# Altium footprint library Connector-FPC.PcbLib: 104 footprints (part 1 of 7)
Each footprint in its own frame and in the unit in brackets; x right, y up, seen from the top. Pads: shape width x height; smd on the part's side, far side on the other; paste and mask are expansions set on the pad; w line width, h text height; cw(c..) or ccw(c..) is an arc to the next point about the centre after c.
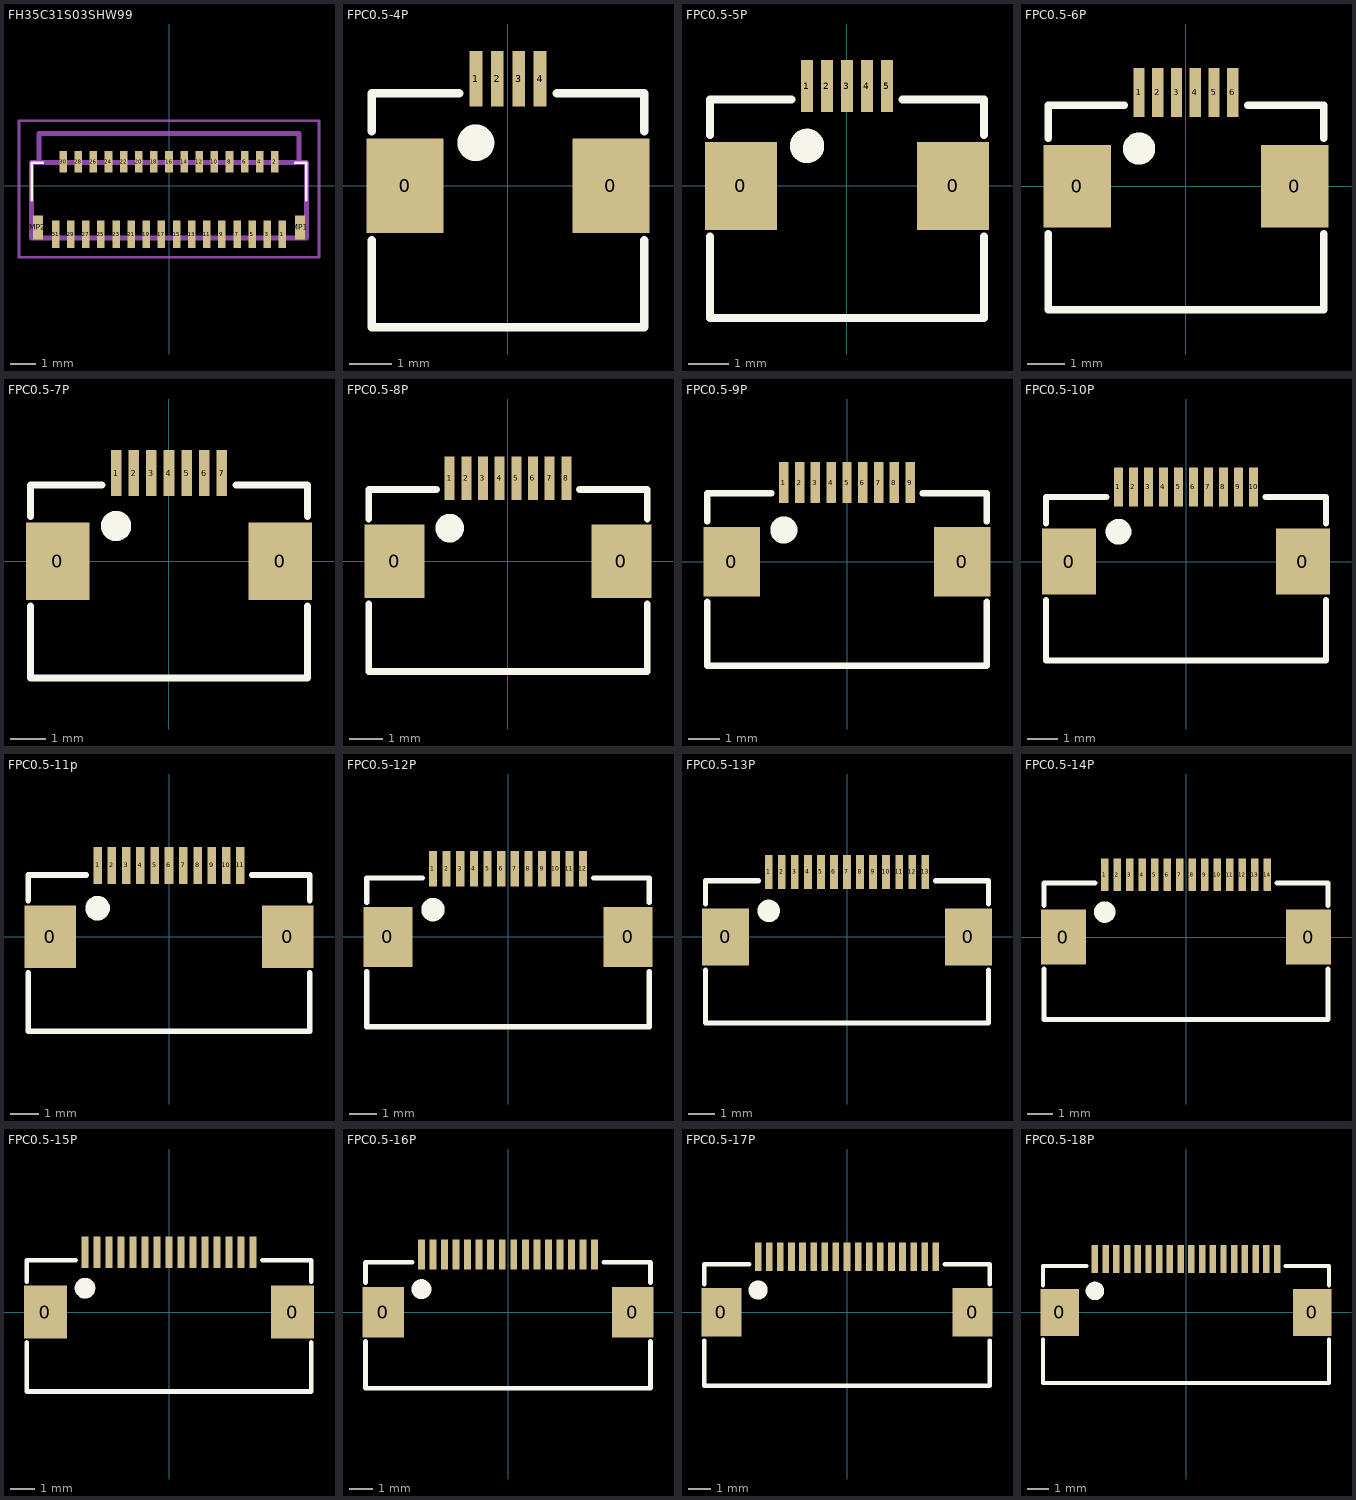
[diagram p0: the footprints below, top view; thin cyan lines are the x and y axes]

## FH35C31S03SHW99 [mm]
pads (33):
  rect 0.3x1.1 smd: 1(4.5,-1.925) 3(3.9,-1.925) 5(3.3,-1.925) 7(2.7,-1.925) 9(2.1,-1.925) 11(1.5,-1.925) 13(0.9,-1.925) 15(0.3,-1.925) 17(-0.3,-1.925) 19(-0.9,-1.925) 21(-1.5,-1.925) 23(-2.1,-1.925) 25(-2.7,-1.925) 27(-3.3,-1.925) 29(-3.9,-1.925) 31(-4.5,-1.925)
  rect 0.3x0.85 smd: 2(4.2,0.95) 4(3.6,0.95) 6(3,0.95) 8(2.4,0.95) 10(1.8,0.95) 12(1.2,0.95) 14(0.6,0.95) 16(0,0.95) 18(-0.6,0.95) 20(-1.2,0.95) 22(-1.8,0.95) 24(-2.4,0.95) 26(-3,0.95) 28(-3.6,0.95) 30(-4.2,0.95)
  rect 0.4x0.95 smd: MP1(5.2,-1.65) MP2(-5.2,-1.65)
Top Overlay:
  lines w0.1: -5.45,-0.575 -5.45,0.925 -5,0.925 ; 5,0.925 5.45,0.925 5.45,-0.575
Body Extra:
  lines w0.2: -5.45,-2.075 -5.45,0.925 5.45,0.925 5.45,-2.075 -5.45,-2.075 ; -5.165,0.925 5.165,0.925 5.165,2.075 -5.165,2.075 -5.165,0.925
Bottom Courtyard:
  lines w0.1: -5.95,-2.825 -5.95,2.575 5.95,2.575 5.95,-2.825 -5.95,-2.825
3D body "FH35-31S-0.3SHW.stp": height 0.84, standoff -0.06, extent -5.45,-2.159 5.45,2.041

## FPC0.5-4P [mm]
pads (6):
  rect 1.8x2.2 smd: 0(-2.4,0) 0(2.4,0)
  rect 0.3x1.3 smd: 1(-0.75,2.497) 2(-0.25,2.497) 3(0.25,2.497) 4(0.75,2.497)
Top Overlay:
  circle w0.5: c-0.75,1 r0.18
  lines w0.2: -3.175,-1.27 -3.175,-3.302 3.175,-3.302 3.175,-1.27 ; -3.175,1.27 -3.175,2.159 -1.143,2.159 ; 1.143,2.159 3.175,2.159 3.175,1.27
3D body "FPC0.5-4P.STEP": height 2, standoff -0.01, extent -3.1,-3.13 3.1,2.87

## FPC0.5-5P [mm]
pads (7):
  rect 1.8x2.2 smd: 0(-2.65,0) 0(2.65,0)
  rect 0.3x1.3 smd: 1(-1,2.497) 2(-0.5,2.497) 3(0,2.497) 4(0.5,2.497) 5(1,2.497)
Top Overlay:
  circle w0.5: c-1,1 r0.18
  lines w0.2: -3.425,-1.27 -3.425,-3.302 3.425,-3.302 3.425,-1.27 ; -3.425,1.27 -3.425,2.159 -1.393,2.159 ; 1.393,2.159 3.425,2.159 3.425,1.27
3D body "FPC0.5-5P.STEP": height 2, standoff -0.01, extent -3.35,-3.15 3.35,2.85

## FPC0.5-6P [mm]
pads (8):
  rect 1.8x2.2 smd: 0(-2.9,0) 0(2.9,0)
  rect 0.3x1.3 smd: 1(-1.25,2.497) 2(-0.75,2.497) 3(-0.25,2.497) 4(0.25,2.497) 5(0.75,2.497) 6(1.25,2.497)
Top Overlay:
  circle w0.5: c-1.25,1 r0.18
  lines w0.2: -3.675,-1.27 -3.675,-3.302 3.675,-3.302 3.675,-1.27 ; -3.675,1.27 -3.675,2.159 -1.643,2.159 ; 1.643,2.159 3.675,2.159 3.675,1.27
3D body "FPC0.5-6P.STEP": height 2, standoff -0.01, extent -3.6,-3.048 3.6,2.952

## FPC0.5-7P [mm]
pads (9):
  rect 1.8x2.2 smd: 0(-3.15,0) 0(3.15,0)
  rect 0.3x1.3 smd: 1(-1.5,2.497) 2(-1,2.497) 3(-0.5,2.497) 4(0,2.497) 5(0.5,2.497) 6(1,2.497) 7(1.5,2.497)
Top Overlay:
  circle w0.5: c-1.5,1 r0.18
  lines w0.2: -3.925,-1.27 -3.925,-3.302 3.925,-3.302 3.925,-1.27 ; -3.925,1.27 -3.925,2.159 -1.893,2.159 ; 1.893,2.159 3.925,2.159 3.925,1.27
3D body "FPC0.5-7P.STEP": height 2, standoff -0.01, extent -3.85,-3.181 3.85,2.819

## FPC0.5-8P [mm]
pads (10):
  rect 1.8x2.2 smd: 0(-3.4,0) 0(3.4,0)
  rect 0.3x1.3 smd: 1(-1.75,2.497) 2(-1.25,2.497) 3(-0.75,2.497) 4(-0.25,2.497) 5(0.25,2.497) 6(0.75,2.497) 7(1.25,2.497) 8(1.75,2.497)
Top Overlay:
  circle w0.5: c-1.75,1 r0.18
  lines w0.2: -4.175,-1.27 -4.175,-3.302 4.175,-3.302 4.175,-1.27 ; -4.175,1.27 -4.175,2.159 -2.143,2.159 ; 2.143,2.159 4.175,2.159 4.175,1.27
3D body "FPC0.5-8P.STEP": height 2, standoff -0.01, extent -4.111,-3.229 4.089,2.771

## FPC0.5-9P [mm]
pads (11):
  rect 1.8x2.2 smd: 0(-3.65,0) 0(3.65,0)
  rect 0.3x1.3 smd: 1(-2,2.497) 2(-1.5,2.497) 3(-1,2.497) 4(-0.5,2.497) 5(0,2.497) 6(0.5,2.497) 7(1,2.497) 8(1.5,2.497) 9(2,2.497)
Top Overlay:
  circle w0.5: c-2,1 r0.18
  lines w0.2: -4.425,-1.27 -4.425,-3.302 4.425,-3.302 4.425,-1.27 ; -4.425,1.27 -4.425,2.159 -2.393,2.159 ; 2.393,2.159 4.425,2.159 4.425,1.27
3D body "FPC0.5-9P.STEP": height 2, standoff -0.01, extent -4.35,-3.15 4.35,2.85

## FPC0.5-10P [mm]
pads (12):
  rect 1.8x2.2 smd: 0(-3.9,0) 0(3.9,0)
  rect 0.3x1.3 smd: 1(-2.25,2.497) 2(-1.75,2.497) 3(-1.25,2.497) 4(-0.75,2.497) 5(-0.25,2.497) 6(0.25,2.497) 7(0.75,2.497) 8(1.25,2.497) 9(1.75,2.497) 10(2.25,2.497)
Top Overlay:
  circle w0.5: c-2.25,1 r0.18
  lines w0.2: -4.675,-1.27 -4.675,-3.302 4.675,-3.302 4.675,-1.27 ; -4.675,1.27 -4.675,2.159 -2.643,2.159 ; 2.643,2.159 4.675,2.159 4.675,1.27
3D body "FPC0.5-10P.STEP": height 2, standoff -0.01, extent -4.6,-3.175 4.6,2.825

## FPC0.5-11p [mm]
pads (13):
  rect 1.8x2.2 smd: 0(-4.15,0) 0(4.15,0)
  rect 0.3x1.3 smd: 1(-2.5,2.497) 2(-2,2.497) 3(-1.5,2.497) 4(-1,2.497) 5(-0.5,2.497) 6(0,2.497) 7(0.5,2.497) 8(1,2.497) 9(1.5,2.497) 10(2,2.497) 11(2.5,2.497)
Top Overlay:
  circle w0.5: c-2.5,1 r0.18
  lines w0.2: -4.925,-1.27 -4.925,-3.302 4.925,-3.302 4.925,-1.27 ; -4.925,1.27 -4.925,2.159 -2.893,2.159 ; 2.893,2.159 4.925,2.159 4.925,1.27
3D body "FPC0.5-11P.STEP": height 2, standoff -0.01, extent -4.85,-3.181 4.85,2.819

## FPC0.5-12P [mm]
pads (14):
  rect 1.8x2.2 smd: 0(-4.4,0) 0(4.4,0)
  rect 0.3x1.3 smd: 1(-2.75,2.497) 2(-2.25,2.497) 3(-1.75,2.497) 4(-1.25,2.497) 5(-0.75,2.497) 6(-0.25,2.497) 7(0.25,2.497) 8(0.75,2.497) 9(1.25,2.497) 10(1.75,2.497) 11(2.25,2.497) 12(2.75,2.497)
Top Overlay:
  circle w0.5: c-2.75,1 r0.18
  lines w0.2: -5.175,-1.27 -5.175,-3.302 5.175,-3.302 5.175,-1.27 ; -5.175,1.27 -5.175,2.159 -3.143,2.159 ; 3.143,2.159 5.175,2.159 5.175,1.27
3D body "FPC0.5-12P.STEP": height 2, standoff -0.01, extent -5.1,-3.231 5.1,2.769

## FPC0.5-13P [mm]
pads (15):
  rect 1.8x2.2 smd: 0(-4.65,0) 0(4.65,0)
  rect 0.3x1.3 smd: 1(-3,2.497) 2(-2.5,2.497) 3(-2,2.497) 4(-1.5,2.497) 5(-1,2.497) 6(-0.5,2.497) 7(0,2.497) 8(0.5,2.497) 9(1,2.497) 10(1.5,2.497) 11(2,2.497) 12(2.5,2.497) 13(3,2.497)
Top Overlay:
  circle w0.5: c-3,1 r0.18
  lines w0.2: -5.425,-1.27 -5.425,-3.302 5.425,-3.302 5.425,-1.27 ; -5.425,1.27 -5.425,2.159 -3.393,2.159 ; 3.393,2.159 5.425,2.159 5.425,1.27
3D body "FPC0.5-13P.STEP": height 2, standoff -0.01, extent -5.35,-3.181 5.35,2.819

## FPC0.5-14P [mm]
pads (16):
  rect 1.8x2.2 smd: 0(-4.9,0) 0(4.9,0)
  rect 0.3x1.3 smd: 1(-3.25,2.497) 2(-2.75,2.497) 3(-2.25,2.497) 4(-1.75,2.497) 5(-1.25,2.497) 6(-0.75,2.497) 7(-0.25,2.497) 8(0.25,2.497) 9(0.75,2.497) 10(1.25,2.497) 11(1.75,2.497) 12(2.25,2.497) 13(2.75,2.497) 14(3.25,2.497)
Top Overlay:
  circle w0.5: c-3.25,1 r0.18
  lines w0.2: -5.675,-1.27 -5.675,-3.302 5.675,-3.302 5.675,-1.27 ; -5.675,1.27 -5.675,2.159 -3.643,2.159 ; 3.643,2.159 5.675,2.159 5.675,1.27
3D body "FPC0.5-14P.STEP": height 2, standoff -0.01, extent -5.6,-3.226 5.6,2.774

## FPC0.5-15P [mm]
pads (17):
  rect 1.8x2.2 smd: 0(-5.15,0) 0(5.15,0)
  rect 0.3x1.3 smd: 1(-3.5,2.497) 2(-3,2.497) 3(-2.5,2.497) 4(-2,2.497) 5(-1.5,2.497) 6(-1,2.497) 7(-0.5,2.497) 8(0,2.497) 9(0.5,2.497) 10(1,2.497) 11(1.5,2.497) 12(2,2.497) 13(2.5,2.497) 14(3,2.497) 15(3.5,2.497)
Top Overlay:
  circle w0.5: c-3.5,1 r0.18
  lines w0.2: -5.925,-1.27 -5.925,-3.302 5.925,-3.302 5.925,-1.27 ; -5.925,1.27 -5.925,2.159 -3.893,2.159 ; 3.893,2.159 5.925,2.159 5.925,1.27
3D body "FPC0.5-15P.STEP": height 2, standoff -0.01, extent -5.875,-3.257 5.825,2.743

## FPC0.5-16P [mm]
pads (18):
  rect 1.8x2.2 smd: 0(-5.4,0) 0(5.4,0)
  rect 0.3x1.3 smd: 1(-3.75,2.497) 2(-3.25,2.497) 3(-2.75,2.497) 4(-2.25,2.497) 5(-1.75,2.497) 6(-1.25,2.497) 7(-0.75,2.497) 8(-0.25,2.497) 9(0.25,2.497) 10(0.75,2.497) 11(1.25,2.497) 12(1.75,2.497) 13(2.25,2.497) 14(2.75,2.497) 15(3.25,2.497) 16(3.75,2.497)
Top Overlay:
  circle w0.5: c-3.75,1 r0.18
  lines w0.2: -6.175,-1.27 -6.175,-3.302 6.175,-3.302 6.175,-1.27 ; -6.175,1.27 -6.175,2.159 -4.143,2.159 ; 4.143,2.159 6.175,2.159 6.175,1.27
3D body "FPC0.5-16P.STEP": height 2, standoff -0.01, extent -6.1,-3.231 6.1,2.769

## FPC0.5-17P [mm]
pads (19):
  rect 1.8x2.2 smd: 0(-5.65,0) 0(5.65,0)
  rect 0.3x1.3 smd: 1(-4,2.497) 2(-3.5,2.497) 3(-3,2.497) 4(-2.5,2.497) 5(-2,2.497) 6(-1.5,2.497) 7(-1,2.497) 8(-0.5,2.497) 9(0,2.497) 10(0.5,2.497) 11(1,2.497) 12(1.5,2.497) 13(2,2.497) 14(2.5,2.497) 15(3,2.497) 16(3.5,2.497) 17(4,2.497)
Top Overlay:
  circle w0.5: c-4,1 r0.18
  lines w0.2: -6.425,-1.27 -6.425,-3.302 6.425,-3.302 6.425,-1.27 ; -6.425,1.27 -6.425,2.159 -4.393,2.159 ; 4.393,2.159 6.425,2.159 6.425,1.27
3D body "FPC0.5-17P.STEP": height 2, standoff -0.01, extent -6.375,-3.206 6.325,2.794

## FPC0.5-18P [mm]
pads (20):
  rect 1.8x2.2 smd: 0(-5.9,0) 0(5.9,0)
  rect 0.3x1.3 smd: 1(-4.25,2.497) 2(-3.75,2.497) 3(-3.25,2.497) 4(-2.75,2.497) 5(-2.25,2.497) 6(-1.75,2.497) 7(-1.25,2.497) 8(-0.75,2.497) 9(-0.25,2.497) 10(0.25,2.497) 11(0.75,2.497) 12(1.25,2.497) 13(1.75,2.497) 14(2.25,2.497) 15(2.75,2.497) 16(3.25,2.497) 17(3.75,2.497) 18(4.25,2.497)
Top Overlay:
  circle w0.5: c-4.25,1 r0.18
  lines w0.2: -6.675,-1.27 -6.675,-3.302 6.675,-3.302 6.675,-1.27 ; -6.675,1.27 -6.675,2.159 -4.643,2.159 ; 4.643,2.159 6.675,2.159 6.675,1.27
3D body "FPC0.5-18P.STEP": height 2, standoff -0.01, extent -6.625,-3.257 6.575,2.743